# Altium schematic symbol library SSSS820501.SchLib: 1 symbol
Pins are listed as number, name and electrical type; pins without a type are passive.

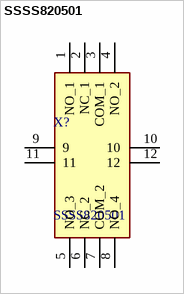
[diagram p0: symbol SSSS820501]

## SSSS820501
designator X?
Slide Switches DP3T VERT GND 1.5mm; Manufacturer_Name: ALPS Electric; Geometry.Height: 1.6mm; Mouser Part Number: 688-SSSS820501; Mouser Price/Stock: https://www.mouser.co.uk/ProductDetail/ALPS/SSSS820501?qs=N5Jky1br14OXv4vkkV%252B%252B4A%3D%3D; Manufacturer_Part_Number: SSSS820501; Datasheet Link: https://www.alps.com/prod/info/E/HTML/Switch/Slide/SSSS8/SSSS820501.html
footprint SSSS820501
pins: 1 NO_1, 2 NC_1, 3 COM_1, 4 NO_2, 5 NO_3, 6 NC_2, 7 COM_2, 8 NO_4, 9, 10, 11, 12